# Altium integrated library MMBF5457_.IntLib: 1 symbol
Pins are listed as number, name and electrical type; pins without a type are passive.

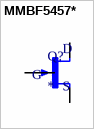
[diagram p0: symbol MMBF5457*]

## MMBF5457*
designator Q?
JFET N-Channel 25 V 350 mW Surface Mount SOT-23-3; MF: ON Semiconductor; MP: MMBF5457; SnapEDA_Link: https://www.snapeda.com/parts/MMBF5457/Onsemi/view-part/?ref=snap; Package: SOT-23-3 ON Semiconductor; Value: *; Check_prices: https://www.snapeda.com/parts/MMBF5457/Onsemi/view-part/?ref=eda
footprint SOT23
pins: 1 D, 2 S, 3 G